# Altium footprint library custom-case.PcbLib: 483 footprints (part 24 of 31)
Each footprint in its own frame and in the unit in brackets; x right, y up, seen from the top. Pads: shape width x height; smd on the part's side, far side on the other; paste and mask are expansions set on the pad; w line width, h text height; cw(c..) or ccw(c..) is an arc to the next point about the centre after c.
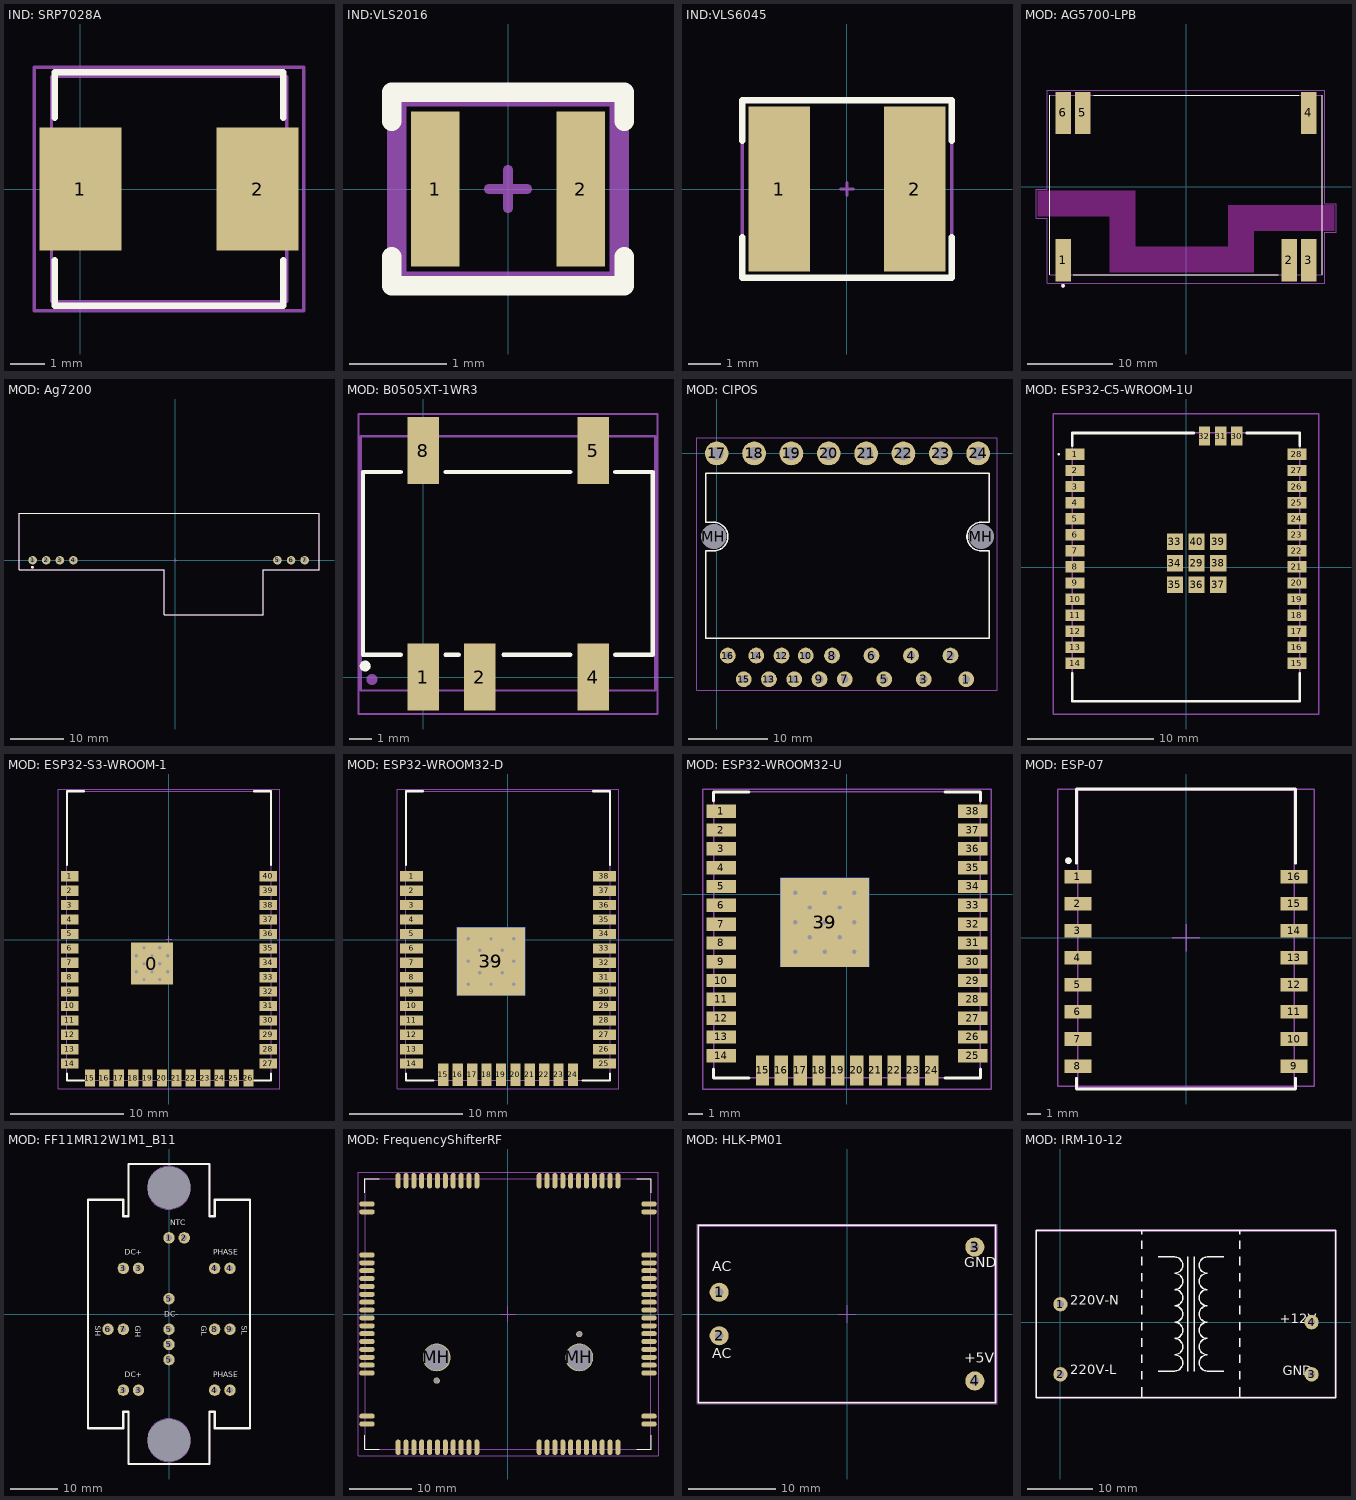
[diagram p23: the footprints below, top view; thin cyan lines are the x and y axes]

## IND: SRP7028A [mm]
pads (2):
  rect 2.4x3.6 smd: 1(0,0) 2(5.2,0)
Top Overlay:
  lines w0.2: -0.75,-2.1 -0.75,-3.425 5.95,-3.425 5.95,-2.1 ; -0.75,2.1 -0.75,3.425 5.95,3.425 5.95,2.1
Top Assy:
  lines w0.1: -0.847,-3.301 -0.847,3.299 6.053,3.299 6.053,-3.301 -0.847,-3.301
Size Area:
  lines w0.1: -1.35,-3.575 6.55,-3.575 6.55,3.575 -1.35,3.575 -1.35,-3.575
3D body "SRP 7028A series.STEP": height 2.83, standoff 0, extent -0.847,-3.301 6.053,3.299

## IND:VLS2016 [mm]
pads (2):
  rect 0.5x1.6 smd: 1(-0.75,0) 2(0.75,0)
Top Overlay:
  lines w0.2: -1.2,-0.7 -1.2,-1 1.2,-1 1.2,-0.7 ; -1.2,0.7 -1.2,1 1.2,1 1.2,0.7
Top Assy:
  lines w0.1: -1.1,-0.9 1.1,-0.9 1.1,0.9 -1.1,0.9 -1.1,-0.9
Size Area:
  lines w0.1: -0.2,0 0.2,0 ; 0,-0.2 0,0.2 ; -1.2,-1 1.2,-1 1.2,1 -1.2,1 -1.2,-1
3D body "vls201610hbx-1.step": height 0.99, standoff -0.01, extent -1,-0.8 1,0.8

## IND:VLS6045 [mm]
pads (2):
  rect 1.9x5.1 smd: 1(-2.1,0) 2(2.1,0)
Top Overlay:
  lines w0.2: -3.25,-1.5 -3.25,-2.75 3.25,-2.75 3.25,-1.5 ; -3.25,1.494 -3.25,2.75 3.25,2.75 3.25,1.5
Top Assy:
  lines w0.1: -3.25,2.75 -3.25,-2.75 3.25,-2.75 3.25,2.75 -3.241,2.75
Size Area:
  lines w0.1: -0.2,0 0.2,0 ; 0,-0.2 0,0.2 ; -3.25,-2.75 3.25,-2.75 3.25,2.75 -3.25,2.75 -3.25,-2.75
3D body "vls6045ex.step": height 4.49, standoff -0.01, extent -3,-3 3,3

## MOD: AG5700-LPB [mm]
pads (7):
  rect 1.83x5 smd: 1(-14.505,-8.7) 2(12.165,-8.7) 3(14.505,-8.7) 4(14.505,8.7) 5(-12.165,8.7) 6(-14.505,8.7)
  round 0.5 on Mech1: ""(-14.505,-11.7)
Top Overlay:
  circle w0.2: c-14.505,-11.7 r0.1
  lines w0.127: -16.1,-10.41 -16.1,10.8 ; -13.3,-10.4 10.9,-10.4 ; -10.9,10.8 13.3,10.8 ; 16.1,-10.41 16.1,10.8
Keep-Out Layer:
  region: -6,-7.1 5,-7.1 5,-2.2 17.5,-2.2 17.5,-5.2 8,-5.2 8,-10.1 -9,-10.1 -9,-3.5 -17.5,-3.5 -17.5,-0.5 -6,-0.5
Top Assy:
  lines w0.1: -16.1,-10.4 -16.1,10.8 16.1,10.8 16.1,-10.4 -16.1,-10.4
Size Area:
  lines w0.05: -17.7,-3.7 -17.7,-0.3 -16.4,-0.3 -16.4,11.4 16.4,11.4 16.4,-2 17.7,-2 17.7,-5.4 16.4,-5.4 16.4,-11.4 -16.375,-11.4 -16.375,-3.7 -17.7,-3.7
3D body "Ag5700.step": height 11.52, standoff -0.16, extent -15.872,-9.958 15.878,10.362

## MOD: Ag7200 [mm] "DC-DC"
pads (9):
  round 1.6 hole 0.9: 1(-26.67,0) 2(-24.13,0) 3(-21.59,0) 4(-19.05,0) 5(19.05,0) 6(21.59,0) 7(24.13,0)
  round 0.5 on Mech1: ""(-26.7,-1.3)
  round 0.5 on Top Overlay: ""(-26.7,-1.3)
Top Overlay:
  lines w0.2: -29.21,-1.8 -29.21,8.8 26.8,8.8 26.8,-1.8 16.4,-1.8 16.4,-10.2 -2.1,-10.2 -2.1,-1.8 -29.21,-1.8
Top Assy:
  lines w0.2: -29.2,-1.8 -29.2,8.8 26.8,8.8 26.8,-1.8 16.4,-1.8 16.4,-10.2 -2.1,-10.2 -2.1,-1.8 -29.2,-1.8
Size Area:
  lines w0.1: -29.2,-1.8 -29.2,8.8 26.8,8.8 26.8,-1.8 ; -0.3,0 0.3,0 ; 0,-0.3 0,0.3
  lines w0.2: -29.2,-1.8 -2.1,-1.8 -2.1,-10.2 16.4,-10.2 16.4,-1.8 26.8,-1.8
3D body "Ag7200.step": height 14, standoff -3, extent -29.21,-10.2 26.79,8.8

## MOD: B0505XT-1WR3 [mm]
pads (7):
  rect 1.4x3 smd: 1(0,0) 2(2.54,0) 4(7.62,0) 5(7.62,10.16) 8(0,10.16)
  round 0.5 on Top Overlay: ""(-2.6,0.5)
  round 0.5 on Mech1: ""(-2.3,-0.1)
Top Overlay:
  lines w0.2: -1,1 -2.7,1 -2.7,9.2 -1,9.2 ; 1,1 1.6,1 ; 1,9.2 6.6,9.2 ; 3.6,1 6.6,1 ; 8.62,1 10.3,1 10.3,9.2 8.62,9.2
Top Assy:
  lines w0.1: -2.8,-0.6 -2.8,10.8 10.4,10.8 10.4,-0.6 -2.8,-0.6
Size Area:
  lines w0.1: -2.897,-1.65 10.5,-1.65 10.5,11.8 0.4,11.8 -2.897,11.8 -2.897,-1.65
3D body "1WR3.STEP": height 7.25, standoff 0, extent -2.8,-0.6 10.4,10.8

## MOD: CIPOS [mm]
pads (26):
  round 2 hole 1 mask+0.075: 1(31.61,-28.6) 2(29.61,-25.6) 3(26.21,-28.6) 4(24.61,-25.6) 5(21.21,-28.6) 6(19.61,-25.6) 7(16.21,-28.6) 8(14.61,-25.6) 9(13.01,-28.6) 10(11.27,-25.6) 11(9.81,-28.6) 12(8.21,-25.6) 13(6.61,-28.6) 14(5.01,-25.6) 15(3.41,-28.6) 16(1.41,-25.6)
  round 3 hole 1.7 mask+0.075: 17(0,0) 18(4.73,0) 19(9.46,0) 20(14.19,0) 21(18.92,0) 22(23.65,0) 23(28.38,0) 24(33.11,0)
  round 3 hole 3.2 mask+0.075: MH(-0.39,-10.525) MH(33.5,-10.525)
Top Overlay:
  lines w0.2: -1.39,-23.4 -1.39,-12.325 -0.39,-12.325 ccw(c-0.39,-10.525) -0.39,-8.725 -1.39,-8.725 -1.39,-2.5 34.5,-2.5 34.5,-8.725 33.5,-8.725 ccw(c33.5,-10.525) 33.5,-12.325 34.5,-12.325 34.51,-23.4 -1.39,-23.4
Top Assy:
  lines w0.1: -1.39,-23.4 34.51,-23.4 34.5,-12.325 33.5,-12.325 cw(c33.5,-10.525) 33.5,-8.725 34.5,-8.725 34.5,-2.5 -1.39,-2.5 -1.39,-8.725 -0.39,-8.725 cw(c-0.39,-10.525) -0.39,-12.325 -1.39,-12.325 -1.39,-23.4
Size Area:
  lines w0.1: -2.5,-30 -2.5,2 35.5,2 35.5,-30 -2.5,-30
3D body "CIPOS.STEP": height 3.9, standoff -3.8, extent -1.59,-29.258 34.71,0.575

## MOD: ESP32-C5-WROOM-1U [mm]
pads (40):
  rect 1.5x0.9 smd: 1(-8.75,8.91) 2(-8.75,7.64) 3(-8.75,6.37) 4(-8.75,5.1) 5(-8.75,3.83) 6(-8.75,2.56) 7(-8.75,1.29) 8(-8.75,0.02) 9(-8.75,-1.25) 10(-8.75,-2.52) 11(-8.75,-3.79) 12(-8.75,-5.06) 13(-8.75,-6.33) 14(-8.75,-7.6) 15(8.75,-7.6) 16(8.75,-6.33) 17(8.75,-5.06) 18(8.75,-3.79) 19(8.75,-2.52) 20(8.75,-1.25) 21(8.75,0.02) 22(8.75,1.29) 23(8.75,2.56) 24(8.75,3.83) 25(8.75,5.1) 26(8.75,6.37) 27(8.75,7.64) 28(8.75,8.91)
  rect 1.3x1.3 smd: 29(0.83,0.322) 33(-0.87,2.022) 34(-0.87,0.322) 35(-0.87,-1.378) 36(0.83,-1.378) 37(2.53,-1.378) 38(2.53,0.322) 39(2.53,2.022) 40(0.83,2.022)
  rect 0.9x1.5 smd: 30(4,10.35) 31(2.73,10.35) 32(1.46,10.35)
Top Overlay:
  lines w0.1: -10.1,8.91 ccw(c-10.05,8.91) -10,8.91 ; -10.1,8.91 cw(c-10.05,8.91) -10,8.91 ; -10.1,8.91 ccw(c-10.05,8.91) -10,8.91
  lines w0.2: -9,-8.4 -9,-10.6 9,-10.6 9,-8.4 ; -9,9.6 -9,10.6 0.6,10.6 ; 4.8,10.6 9,10.6 9,9.6
Size Area:
  lines w0.1: -9,-10.6 -9,10.6 9,10.6 9,-10.6 -9,-10.6
Mechanical 20:
  lines w0.1: -10.5,-11.6 -10.5,12.1 10.5,12.1 10.5,-11.6 -10.5,-11.6
3D body "ESP32-C5-WROOM-1U-N8R8.stp": height 3.45, standoff 0, extent -9,-10.6 9,10.6

## MOD: ESP32-S3-WROOM-1 [mm]
pads (41):
  rect 3.7x3.7 smd paste-2539.97: 0(-1.5,-2.1)
  rect 1.5x0.9 smd: 1(-8.75,5.6) 2(-8.75,4.33) 3(-8.75,3.06) 4(-8.75,1.79) 5(-8.75,0.52) 6(-8.75,-0.75) 7(-8.75,-2.02) 8(-8.75,-3.29) 9(-8.75,-4.56) 10(-8.75,-5.83) 11(-8.75,-7.1) 12(-8.75,-8.37) 13(-8.75,-9.64) 14(-8.75,-10.91) 27(8.75,-10.91) 28(8.75,-9.64) 29(8.75,-8.37) 30(8.75,-7.1) 31(8.75,-5.83) 32(8.75,-4.56) 33(8.75,-3.29) 34(8.75,-2.02) 35(8.75,-0.75) 36(8.75,0.52) 37(8.75,1.79) 38(8.75,3.06) 39(8.75,4.33) 40(8.75,5.6)
  rect 0.9x1.5 smd: 15(-6.97,-12.2) 16(-5.7,-12.2) 17(-4.43,-12.2) 18(-3.16,-12.2) 19(-1.89,-12.2) 20(-0.62,-12.2) 21(0.65,-12.2) 22(1.92,-12.2) 23(3.19,-12.2) 24(4.46,-12.2) 25(5.73,-12.2) 26(7,-12.2)
via -0.1,-2.8 diameter 0.7 hole 0.3
via -2.9,-2.8 diameter 0.7 hole 0.3
via -2.9,-1.4 diameter 0.7 hole 0.3
via -0.1,-1.4 diameter 0.7 hole 0.3
via -0.8,-3.5 diameter 0.7 hole 0.3
via -2.2,-3.5 diameter 0.7 hole 0.3
via -2.2,-0.7 diameter 0.7 hole 0.3
via -0.8,-0.7 diameter 0.7 hole 0.3
via -0.8,-2.1 diameter 0.7 hole 0.3
via -2.2,-2.1 diameter 0.7 hole 0.3
via -1.5,-2.8 diameter 0.7 hole 0.3
via -1.5,-1.4 diameter 0.7 hole 0.3
Top Overlay:
  lines w0.2: -9,-11.8 -9,-12.4 -7.5,-12.4 ; -9,6.6 -9,7.6 -9,13.1 -7.5,13.1 ; 7.5,-12.4 9,-12.4 9,-11.8 ; 7.5,13.1 9,13.1 9,7.6 9,6.6
Top Paste:
  region: -0.55,-1.65 -0.55,-2.55 0.35,-2.55 0.35,-1.65
  region: -1.95,-1.15 -1.05,-1.15 -1.05,-0.25 -1.95,-0.25
  region: -2.45,-2.55 -2.45,-1.65 -3.35,-1.65 -3.35,-2.55
  region: -1.05,-3.05 -1.95,-3.05 -1.95,-3.95 -1.05,-3.95
  region: -2.45,-3.05 -3.35,-3.05 -3.35,-3.95 -2.45,-3.95
  region: 0.35,-3.05 -0.55,-3.05 -0.55,-3.95 0.35,-3.95
  region: -0.55,-0.25 -0.55,-1.15 0.35,-1.15 0.35,-0.25
  region: -2.45,-0.25 -2.45,-1.15 -3.35,-1.15 -3.35,-0.25
  region: -1.95,-1.65 -1.95,-2.55 -1.05,-2.55 -1.05,-1.65
Top Assy:
  lines w0.1: -9,-12.4 -9,13.1 ; -9,-12.4 9,-12.4 ; -9,-12.4 -9,13.1 ; -9,-12.4 9,-12.4 ; -9,13.1 9,13.1 ; -9,13.1 9,13.1 ; 9,-12.4 9,13.1 ; 9,-12.4 9,13.1
Size Area:
  lines w0.1: -0.25,0.05 0.25,0.05 ; 0,-0.2 0,0.3 ; -9.75,-13.15 9.75,-13.15 9.75,13.3 -9.75,13.3 -9.75,-13.15
3D body "ESP32-S3-WROOM-1-N8R2--3DModel-STEP-56544.STEP": height 3.25, standoff 0, extent -9,-12.41 9,13.09

## MOD: ESP32-WROOM32-D [mm]
pads (40):
  rect 2x0.9 smd: 1(-8.5,5.6) 2(-8.5,4.33) 3(-8.5,3.06) 4(-8.5,1.79) 5(-8.5,0.52) 6(-8.5,-0.75) 7(-8.5,-2.02) 8(-8.5,-3.29) 9(-8.5,-4.56) 10(-8.5,-5.83) 11(-8.5,-7.1) 12(-8.5,-8.37) 13(-8.5,-9.64) 14(-8.5,-10.91) 25(8.5,-10.91) 26(8.5,-9.64) 27(8.5,-8.37) 28(8.5,-7.1) 29(8.5,-5.83) 30(8.5,-4.56) 31(8.5,-3.29) 32(8.5,-2.02) 33(8.5,-0.75) 34(8.5,0.52) 35(8.5,1.79) 36(8.5,3.06) 37(8.5,4.33) 38(8.5,5.6)
  rect 0.9x2 smd: 15(-5.7,-11.9) 16(-4.43,-11.9) 17(-3.16,-11.9) 18(-1.89,-11.9) 19(-0.62,-11.9) 20(0.65,-11.9) 21(1.92,-11.9) 22(3.19,-11.9) 23(4.46,-11.9) 24(5.73,-11.9)
  rect 6x6 smd far side: 39(-1.5,-1.9)
  rect 6x6 smd: 39(-1.5,-1.9)
via -1.5,-1.9 diameter 0.7 hole 0.3
via -0.5,-0.9 diameter 0.7 hole 0.3
via -2.5,-0.9 diameter 0.7 hole 0.3
via -2.5,-2.9 diameter 0.7 hole 0.3
via -0.5,-2.9 diameter 0.7 hole 0.3
via 0.5,0.1 diameter 0.7 hole 0.3
via 0.5,-3.9 diameter 0.7 hole 0.3
via -3.5,-3.9 diameter 0.7 hole 0.3
via -3.5,0.1 diameter 0.7 hole 0.3
via -1.5,0.1 diameter 0.7 hole 0.3
via 0.5,-1.9 diameter 0.7 hole 0.3
via -1.5,-3.9 diameter 0.7 hole 0.3
via -3.5,-1.9 diameter 0.7 hole 0.3
Top Overlay:
  lines w0.2: -9,-11.8 -9,-12.4 -6.6,-12.4 ; -9,6.6 -9,7.6 -9,13.1 -7.5,13.1 ; 6.6,-12.4 9,-12.4 9,-11.8 ; 7.5,13.1 9,13.1 9,7.6 9,6.6
Top Assy:
  lines w0.1: -9,-12.4 -9,13.1 ; -9,-12.4 9,-12.4 ; -9,-12.4 -9,13.1 ; -9,-12.4 9,-12.4 ; -9,13.1 9,13.1 ; -9,13.1 9,13.1 ; 9,-12.4 9,13.1 ; 9,-12.4 9,13.1
Size Area:
  lines w0.1: -0.25,0.05 0.25,0.05 ; 0,-0.2 0,0.3 ; -9.75,-13.15 9.75,-13.15 9.75,13.3 -9.75,13.3 -9.75,-13.15
3D body "User Library-ESP321.STEP": height 2.91, standoff -0.01, extent -9,-12.4 9,13.1

## MOD: ESP32-WROOM32-U [mm]
pads (40):
  rect 2x0.9 smd: 1(-8.5,5.6) 2(-8.5,4.33) 3(-8.5,3.06) 4(-8.5,1.79) 5(-8.5,0.52) 6(-8.5,-0.75) 7(-8.5,-2.02) 8(-8.5,-3.29) 9(-8.5,-4.56) 10(-8.5,-5.83) 11(-8.5,-7.1) 12(-8.5,-8.37) 13(-8.5,-9.64) 14(-8.5,-10.91) 25(8.5,-10.91) 26(8.5,-9.64) 27(8.5,-8.37) 28(8.5,-7.1) 29(8.5,-5.83) 30(8.5,-4.56) 31(8.5,-3.29) 32(8.5,-2.02) 33(8.5,-0.75) 34(8.5,0.52) 35(8.5,1.79) 36(8.5,3.06) 37(8.5,4.33) 38(8.5,5.6)
  rect 0.9x2 smd: 15(-5.7,-11.9) 16(-4.43,-11.9) 17(-3.16,-11.9) 18(-1.89,-11.9) 19(-0.62,-11.9) 20(0.65,-11.9) 21(1.92,-11.9) 22(3.19,-11.9) 23(4.46,-11.9) 24(5.73,-11.9)
  rect 6x6 smd far side: 39(-1.5,-1.9)
  rect 6x6 smd: 39(-1.5,-1.9)
via -3.5,-1.9 diameter 0.7 hole 0.3
via -1.5,-3.9 diameter 0.7 hole 0.3
via 0.5,-1.9 diameter 0.7 hole 0.3
via -1.5,0.1 diameter 0.7 hole 0.3
via -3.5,0.1 diameter 0.7 hole 0.3
via -3.5,-3.9 diameter 0.7 hole 0.3
via 0.5,-3.9 diameter 0.7 hole 0.3
via 0.5,0.1 diameter 0.7 hole 0.3
via -0.5,-2.9 diameter 0.7 hole 0.3
via -2.5,-2.9 diameter 0.7 hole 0.3
via -2.5,-0.9 diameter 0.7 hole 0.3
via -0.5,-0.9 diameter 0.7 hole 0.3
via -1.5,-1.9 diameter 0.7 hole 0.3
Top Overlay:
  lines w0.2: -9,-11.8 -9,-12.4 -6.6,-12.4 ; -9,6.3 -9,6.9 -6.6,6.9 ; 6.6,-12.4 9,-12.4 9,-11.8 ; 6.6,6.9 9,6.9 9,6.3
Top Assy:
  lines w0.1: -9,-12.4 9,-12.4 ; -9,-12.4 -9,6.9 ; -9,-12.4 9,-12.4 ; -9,-12.4 -9,6.9 ; -9,6.9 9,6.9 ; -9,6.9 9,6.9 ; 9,-12.4 9,6.9 ; 9,-12.4 9,6.9
Size Area:
  lines w0.1: -0.25,0.05 0.25,0.05 ; 0,-0.2 0,0.3 ; -9.75,-13.15 -9.75,7.1 9.75,7.1 9.75,-13.15 -9.75,-13.15
3D body "ESP32 WROOM-U.STEP": height 3.31, standoff -0.01, extent -9,-12.425 9,6.825

## MOD: ESP-07 [mm]
pads (17):
  rect 2x1 smd: 1(-8,4.5) 2(-8,2.5) 3(-8,0.5) 4(-8,-1.5) 5(-8,-3.5) 6(-8,-5.5) 7(-8,-7.5) 8(-8,-9.5) 9(8,-9.5) 10(8,-7.5) 11(8,-5.5) 12(8,-3.5) 13(8,-1.5) 14(8,0.5) 15(8,2.5) 16(8,4.5)
  round 0.5 on Top Overlay: ""(-8.7,5.7)
Top Overlay:
  lines w0.2: -8.1,-10.4 -8.1,-11.2 8.1,-11.2 8.1,-10.4 ; -8.1,5.5 -8.1,10.9 -8.1,11 8.1,11 8.1,5.5
Top Assy:
  lines w0.1: -8,-11.1 8,-11.1 8,10.9 -8,10.9 -8,-11.1
Size Area:
  lines w0.1: -1,0 1,0 ; 0,-1 0,1 ; -9.5,-11 -9.5,11 9.5,11 9.5,-11 -9.5,-11
3D body "User Library-ESP07-1.STEP": height 3.5, standoff -0.01, extent -8,-11.1 8,10.9

## MOD: FF11MR12W1M1_B11 [mm]
pads (20):
  round 2.4 hole 1.2: 1(0,16) 2(3.2,16) 3(-9.6,-16) 3(-9.6,9.6) 3(-6.4,-16) 3(-6.4,9.6) 4(9.6,-16) 4(9.6,9.6) 4(12.8,-16) 4(12.8,9.6) 5(0,-9.6) 5(0,-6.4) 5(0,-3.2) 5(0,3.2) 6(-12.8,-3.2) 7(-9.6,-3.2) 8(9.6,-3.2) 9(12.8,-3.2)
  round 0 hole 9: MH(0,-26.5) MH(0,26.5)
Top Overlay:
  lines w0.5: -17,-24 -9.6,-24 -9.6,-20.5 -8.5,-20.5 -8.5,-31.5 0,-31.5 8.5,-31.5 8.5,-20.5 9.6,-20.5 9.6,-24 17,-24 17,24 9.6,24 9.6,20.5 8.5,20.5 8.5,31.5 0,31.5 -8.5,31.5 -8.5,20.5 -9.6,20.5 -9.6,24 -17,24 -17,-24
  text "GL" at 6.4,-2.5 h2
  text "SL" at 14.9,-2.5 h2
  text "SH" at -15.9,-2.5 h2
  text "GH" at -7.5,-2.5 h2
  text "DC-" at -1,-1 h2
  text "DC+" at -9.25,-13.75 h2
  text "DC+" at -9.25,12 h2
  text "NTC" at 0.25,18.25 h2
  text "PHASE" at 9.25,-13.75 h2
  text "PHASE" at 9.25,12 h2
Top Assy:
  circle w0.1: c0,-26.5 r4.5
  circle w0.1: c0,26.5 r4.5
  lines w0.1: -17,-24 -9.6,-24 -9.6,-20.5 -8.5,-20.5 -8.5,-31.5 0,-31.5 8.5,-31.5 8.5,-20.5 9.6,-20.5 9.6,-24 17,-24 17,24 9.6,24 9.6,20.5 8.5,20.5 8.5,31.5 0,31.5 -8.5,31.5 -8.5,20.5 -9.6,20.5 -9.6,24 -17,24 -17,-24
3D body "FF11MR12W1M1_B11.step": height 1.4, standoff -15, extent -16.9,-31.4 16.9,31.4

## MOD: FrequencyShifterRF [mm] "V2 Castellated module"
pads (88):
  oval 2.5x0.8 smd: 1(-22.75,17.75) 2(-22.75,16.48) 3(-22.75,9.525) 4(-22.75,8.255) 5(-22.75,6.985) 6(-22.75,5.715) 7(-22.75,4.445) 8(-22.75,3.175) 9(-22.75,1.905) 10(-22.75,0.635) 11(-22.75,-0.635) 12(-22.75,-1.905) 13(-22.75,-3.175) 14(-22.75,-4.445) 15(-22.75,-5.715) 16(-22.75,-6.985) 17(-22.75,-8.255) 18(-22.75,-9.525) 19(-22.75,-16.48) 20(-22.75,-17.75) 43(22.75,-17.75) 44(22.75,-16.48) 45(22.75,-9.525) 46(22.75,-8.255) 47(22.75,-6.985) 48(22.75,-5.715) 49(22.75,-4.445) 50(22.75,-3.175) 51(22.75,-1.905) 52(22.75,-0.635) 53(22.75,0.635) 54(22.75,1.905) 55(22.75,3.175) 56(22.75,4.445) 57(22.75,5.715) 58(22.75,6.985) 59(22.75,8.255) 60(22.75,9.525) 61(22.75,16.48) 62(22.75,17.75)
  oval 0.8x2.5 smd: 21(-17.73,-21.5) 22(-16.46,-21.5) 23(-15.19,-21.5) 24(-13.92,-21.5) 25(-12.65,-21.5) 26(-11.38,-21.5) 27(-10.11,-21.5) 28(-8.84,-21.5) 29(-7.57,-21.5) 30(-6.3,-21.5) 31(-5.03,-21.5) 32(5.03,-21.5) 33(6.3,-21.5) 34(7.57,-21.5) 35(8.84,-21.5) 36(10.11,-21.5) 37(11.38,-21.5) 38(12.65,-21.5) 39(13.92,-21.5) 40(15.19,-21.5) 41(16.46,-21.5) 42(17.73,-21.5) 63(17.73,21.5) 64(16.46,21.5) 65(15.19,21.5) 66(13.92,21.5) 67(12.65,21.5) 68(11.38,21.5) 69(10.11,21.5) 70(8.84,21.5) 71(7.57,21.5) 72(6.3,21.5) 73(5.03,21.5) 74(-5.03,21.5) 75(-6.3,21.5) 76(-7.57,21.5) 77(-8.84,21.5) 78(-10.11,21.5) 79(-11.38,21.5) 80(-12.65,21.5) 81(-13.92,21.5) 82(-15.19,21.5) 83(-16.46,21.5) 84(-17.73,21.5)
  round 1 / inner round 1.524 / far side round 1 hole 0.8: 85(-11.5,-10.75) 86(11.5,-3.25)
  round 4.5 hole 4.2 mask+0.102: MH(-11.5,-7) MH(11.5,-7)
Top Overlay:
  lines w0.2: -23.1,-19.55 -23.1,-21.85 -20.8,-21.85 ; -23.1,19.55 -23.1,21.85 -20.8,21.85 ; 20.8,-21.85 23.1,-21.85 23.1,-19.55 ; 20.8,21.85 23.1,21.85 23.1,19.55
Top Assy:
  lines w0.1: -23,-21.8 23,-21.8 23,21.8 -23,21.8 -23,-21.8
Size Area:
  lines w0.1: -24.2,-22.9 -24.2,22.9 24.2,22.9 24.2,-22.9 -24.2,-22.9
  lines w0.2: -1.25,0 0,0 ; 0,-1.25 0,0 ; 0,1.25 0,0 ; 1.25,0 0,0
3D body "FrequencyShifterRF2E.STEP": height 3.12, standoff 0.02, extent -23,-21.75 23,21.75

## MOD: HLK-PM01 [mm]
height 15
pads (4):
  round 2.2 hole 1: 1(-14.7,2.5) 2(-14.7,-2.5) 3(14.7,7.7) 4(14.7,-7.7)
Top Overlay:
  lines w0.2: -17.1,-10.2 -0.2,-10.2 17.1,-10.2 17.1,10.2 -17.1,10.2 -17.1,-10.2
  text "AC" at -15.5,4.5 h2
  text "AC" at -15.5,-5.5 h2
  text "+5V" at 13.5,-6 h2
  text "GND" at 13.5,5 h2
Top Assy:
  lines w0.1: -17,-10.1 17,-10.1 17,10.1 -17,10.1 -17,-10.1
Size Area:
  lines w0.1: -1,0 1,0 ; 0,-1 0,1 ; -17.25,-10.35 -17.25,10.35 17.25,10.35 17.25,-10.35 -17.25,-10.35
3D body "HLK-PM01.STEP": height 15.07, standoff -4.95, extent -17,-10.1 17,10.1

## MOD: IRM-10-12 [mm]
pads (4):
  round 2.2 hole 1.1: 1(0,2.75) 2(0,-8) 3(38.5,-8) 4(38.5,0)
Top Overlay:
  lines w0.2: 12.5,-11.5 12.5,-10 ; 12.5,-8.75 12.5,-7.5 ; 12.5,-6.25 12.5,-5 ; 12.5,-3.75 12.5,-2.5 ; 12.5,-1.25 12.5,0 ; 12.5,1.25 12.5,2.5 ; 12.5,3.75 12.5,5 ; 12.5,6.25 12.5,7.5 ; 12.5,8.75 12.5,10 ; 12.5,11.25 12.5,12.5 ; 12.5,13.5 12.5,14 ; 15,-7.5 17.5,-7.5 ccw(c17.5,-6.25) 17.5,-5 ccw(c17.5,-3.75) 17.5,-2.5 ccw(c17.5,-1.25) 17.5,0 ccw(c17.5,1.25) 17.5,2.5 ccw(c17.5,3.75) 17.5,5 ccw(c17.5,6.25) 17.5,7.5 ccw(c17.5,8.75) 17.5,10 15,10 ; 19.5,-7.5 19.5,10 ; 20.5,-7.5 20.5,10 ; 25,-7.5 22.5,-7.5 cw(c22.5,-6.25) 22.5,-5 cw(c22.5,-3.75) 22.5,-2.5 cw(c22.5,-1.25) 22.5,0 cw(c22.5,1.25) 22.5,2.5 cw(c22.5,3.75) 22.5,5 cw(c22.5,6.25) 22.5,7.5 cw(c22.5,8.75) 22.5,10 25,10 ; 27.5,-11.5 27.5,-10 ; 27.5,-8.75 27.5,-7.5 ; 27.5,-6.25 27.5,-5 ; 27.5,-3.75 27.5,-2.5 ; 27.5,-1.25 27.5,0 ; 27.5,1.25 27.5,2.5 ; 27.5,3.75 27.5,5 ; 27.5,6.25 27.5,7.5 ; 27.5,8.75 27.5,10 ; 27.5,11.25 27.5,12.5 ; 27.5,13.5 27.5,14 ; -3.75,-11.6 42.25,-11.6 42.25,14.1 -3.75,14.1 -3.75,-11.6
  text "220V-N" at 1.5,2.1 h2.5
  text "220V-L" at 1.5,-8.5 h2.5
  text "+12V" at 33.6,-0.7 h2.5
  text "GND" at 34.1,-8.7 h2.5
Top Assy:
  lines w0.1: -3.6,-11.45 -3.6,13.95 42.099,13.95 42.099,-11.45 -3.6,-11.45
Size Area:
  lines w0.1: -3.7,-11.55 42.2,-11.55 42.2,14.05 -3.7,14.05 -3.7,-11.55
3D body "User Library-IRM-10-12.STEP": height 22.05, standoff -3.5, extent -3.6,-11.45 42.099,13.95